# Altium schematic symbol library MB85RC1MTPNF-G-JNERE1.SchLib: 1 symbol
Pins are listed as number, name and electrical type; pins without a type are passive.

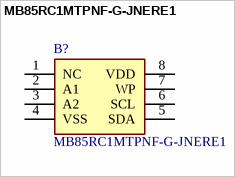
[diagram p0: symbol MB85RC1MTPNF-G-JNERE1]

## MB85RC1MTPNF-G-JNERE1
designator B?
FRAM (Ferroelectric RAM) Memory IC 1Mb (128K x 8) IC 3.4MHz 130ns 8-SOP; Manufacturer_Name: Ramxeed; Geometry.Height: 1.75mm; Manufacturer_Part_Number: MB85RC1MTPNF-G-JNERE1; Mouser Part Number: 249-85C1MTPNFGJNERE1; Mouser Price/Stock: https://www.mouser.co.uk/ProductDetail/Fujitsu-Semiconductor/MB85RC1MTPNF-G-JNERE1?qs=HBWAp0VN4RgMoeX65tnxTQ%3D%3D; Arrow Part Number: *; Arrow Price/Stock: *; Datasheet Link: http://www.fujitsu.com/ca/en/Images/MB85RC1MT-DS501-00027-0v01-E.pdf
footprint SOIC127P600X175-8N
pins: 1 NC, 2 A1, 3 A2, 4 VSS, 5 SDA, 6 SCL, 7 WP, 8 VDD